# Altium footprint library ECG_PCB.PcbLib: 33 footprints (part 3 of 3)
Each footprint in its own frame and in the unit in brackets; x right, y up, seen from the top. Pads: shape width x height; smd on the part's side, far side on the other; paste and mask are expansions set on the pad; w line width, h text height; cw(c..) or ccw(c..) is an arc to the next point about the centre after c.
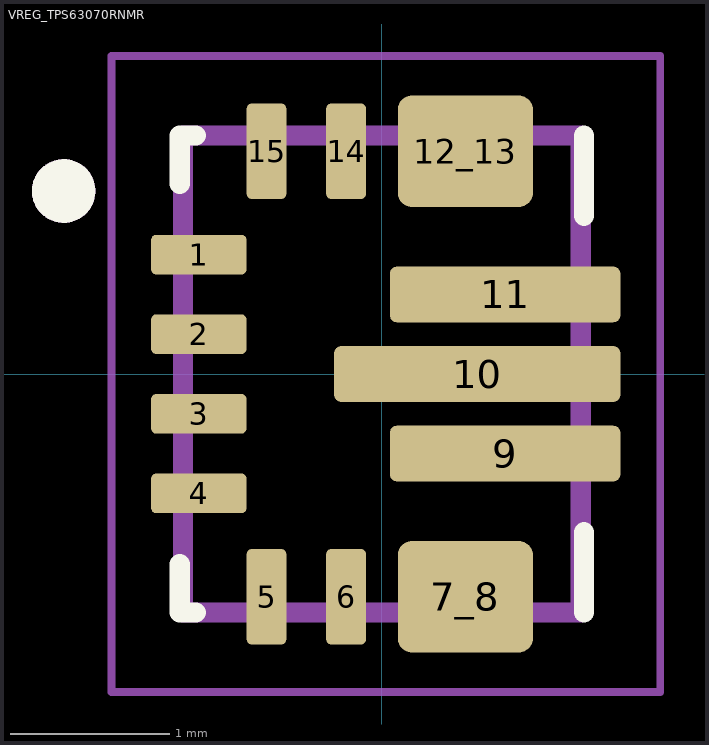
[diagram p2: the footprint, top view; thin cyan lines are the x and y axes]

## VREG_TPS63070RNMR [mm]
height 1
pads (13):
  rrect25% 0.6x0.25 smd paste+0 mask+0: 1(-1.15,0.75) 2(-1.15,0.25) 3(-1.15,-0.25) 4(-1.15,-0.75)
  rrect25% 0.25x0.6 smd paste+0 mask+0: 5(-0.725,-1.4) 6(-0.225,-1.4) 14(-0.225,1.4) 15(-0.725,1.4)
  rrect25% 0.85x0.7 smd paste-1 mask+0: 7_8(0.525,-1.4) 12_13(0.525,1.4)
  rrect25% 1.45x0.35 smd paste-2 mask+0: 9(0.775,-0.5) 11(0.775,0.5)
  rrect25% 1.8x0.35 smd paste-2 mask+0: 10(0.6,0)
Top Overlay:
  circle w0.2: c-2,1.15 r0.1
  lines w0.127: -1.27,-1.195 -1.27,-1.5 -1.17,-1.5 ; -1.27,1.195 -1.27,1.5 -1.17,1.5 ; 1.27,-1.5 1.27,-0.995 ; 1.27,0.995 1.27,1.5
Top Paste:
  drawing of 8 lines, arcs and shapes, not listed
Top Solder:
  drawing of 13 lines, arcs and shapes, not listed
Mechanical 13:
  circle w0.2: c-2,1.15 r0.1
  lines w0.127: -1.25,-1.5 -1.25,1.5 1.25,1.5 1.25,-1.5 -1.25,-1.5
Mechanical 15:
  lines w0.05: -1.7,-2 -1.7,2 1.75,2 1.75,-2 -1.7,-2
3D body "step_temp.STEP": height 1, standoff 0, extent -1.25,-1.5 1.25,1.5